# Altium footprint library Edge Connector PCB with Solder Pads.PcbLib: 3 footprints
Each footprint in its own frame and in the unit in brackets; x right, y up, seen from the top. Pads: shape width x height; smd on the part's side, far side on the other; paste and mask are expansions set on the pad; w line width, h text height; cw(c..) or ccw(c..) is an arc to the next point about the centre after c.
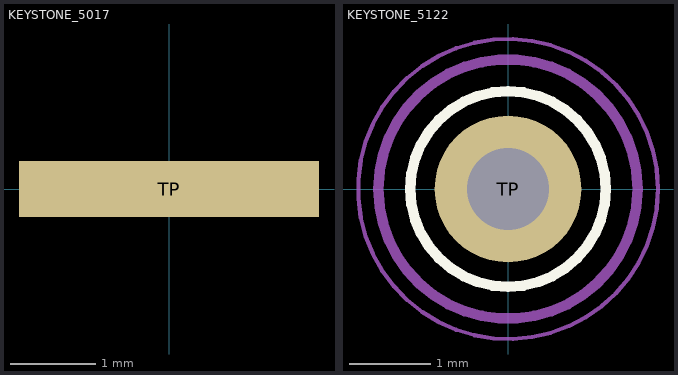
[diagram p0: the footprints below, top view; thin cyan lines are the x and y axes]

## KEYSTONE_5017 [mm]
height 1.52
pads (1):
  rect 3.5x0.65 smd: TP(0,0)

## KEYSTONE_5122 [mm]
height 5.59
pads (1):
  round 1.8 hole 1: TP(0,0)
Top Overlay:
  circle w0.127: c0,0 r1.2
Mechanical 13:
  circle w0.127: c0,0 r1.59
Mechanical 15:
  circle w0.05: c0,0 r1.84

## PCBComponent_1 [mm]